# Altium footprint library Diodes.PcbLib: 7 footprints
Each footprint in its own frame and in the unit in brackets; x right, y up, seen from the top. Pads: shape width x height; smd on the part's side, far side on the other; paste and mask are expansions set on the pad; w line width, h text height; cw(c..) or ccw(c..) is an arc to the next point about the centre after c.
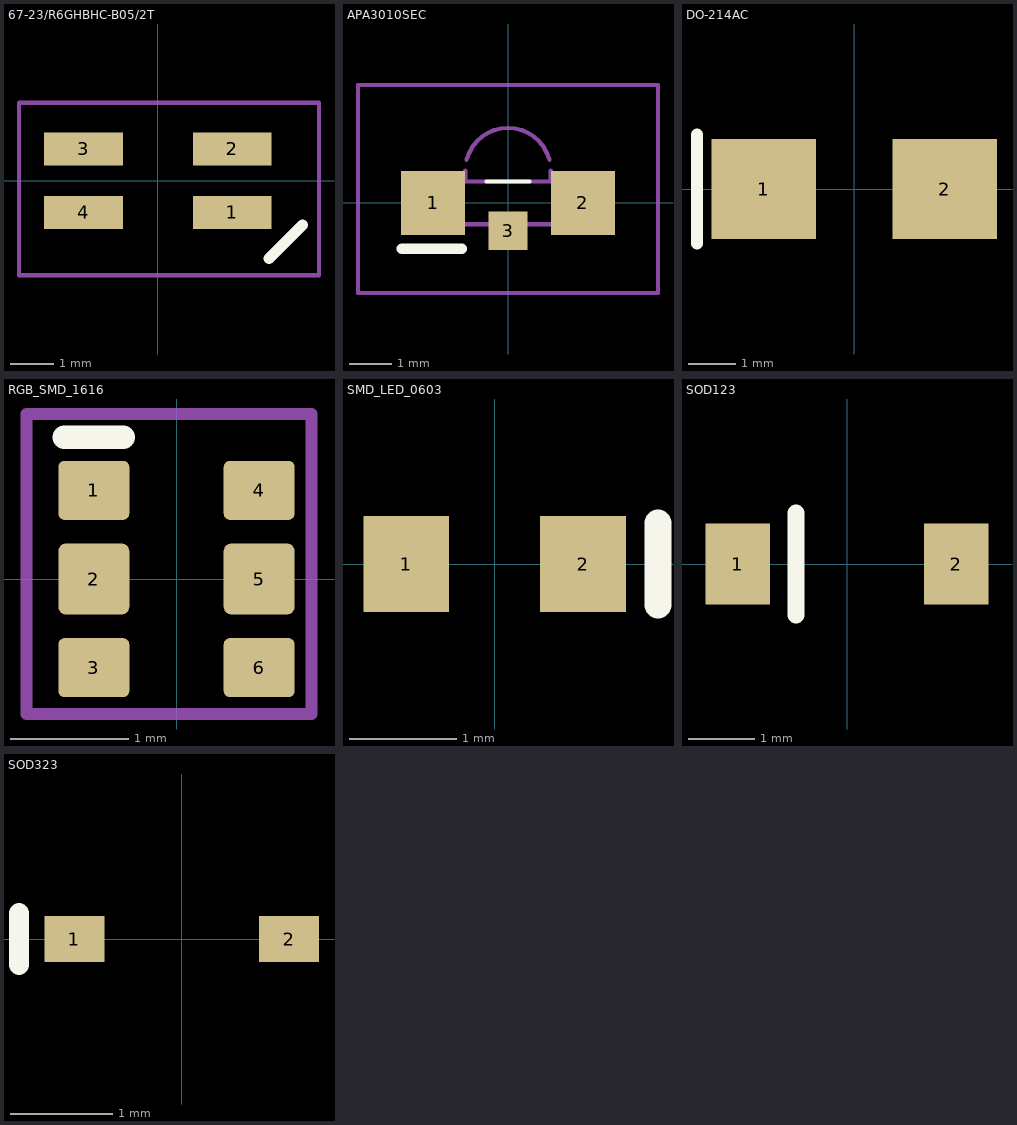
[diagram p0: the footprints below, top view; thin cyan lines are the x and y axes]

## 67-23/R6GHBHC-B05/2T [mm]
pads (4):
  rect 1.8x0.75 smd: 1(1.7,-0.725) 2(1.7,0.725) 3(-1.7,0.725) 4(-1.7,-0.725)
Top Overlay:
  lines w0.254: 2.54,-1.778 3.302,-1.016
Mechanical 15:
  lines w0.1: -3.175,-2.159 3.683,-2.159 3.683,1.778 -3.175,1.778 -3.175,-2.159
3D body "LED_SMD_3528 v4.step": height 1.9, standoff 0, extent -1.75,-1.35 1.75,1.35

## APA3010SEC [mm]
pads (3):
  rect 1.5x1.5 smd: 1(-1.75,0) 2(1.75,0)
  rect 0.9x0.9 smd: 3(0,-0.65)
Top Overlay:
  lines w0.1: -0.5,0.5 0.5,0.5
  lines w0.254: -2.476,-1.07 -2.127,-1.07 -1.429,-1.07 -1.079,-1.07
Mechanical 13:
  lines w0.1: -1,0.5 -1,0.75 ; -0.966,1.009 cw(c0,0.75) 0.966,1.009 ; 1,0.5 1,0.75 ; -1.5,-0.5 -1.5,0.5 1.5,0.5 1.5,-0.5 -1.5,-0.5
Mechanical 15:
  lines w0.1: -3.5,-2.1 -3.5,2.75 3.5,2.75 3.5,-2.1 -3.5,-2.1
3D body "APA3010SEC v2.step": height 1, standoff 0, extent -1.525,-0.374 1.525,1.651

## DO-214AC [mm]
pads (2):
  rect 2.2x2.1 smd: 1(-1.9,0) 2(1.9,0)
Top Overlay:
  lines w0.254: -3.302,-1.143 -3.302,1.143
3D body "DO-214AC v4.step": height 2.15, standoff 0, extent -2.45,-1.348 2.45,1.348

## RGB_SMD_1616 [mm] "3.5mm height, 1.6mm x 1.6mm, 6-pad, RGB"
pads (6):
  rrect20% 0.6x0.5 smd mask+0.03: 1(-0.7,0.75) 3(-0.7,-0.75) 4(0.7,0.75) 6(0.7,-0.75)
  rrect20% 0.6x0.6 smd mask+0.03: 2(-0.7,0) 5(0.7,0)
Top Overlay:
  lines w0.2: -0.95,1.2 -0.45,1.2
Mechanical 15:
  lines w0.1: -1.27,-1.143 -1.27,1.397 1.143,1.397 1.143,-1.143 -1.27,-1.143
3D body "1616v2.step": height 0.37, standoff 0, extent -0.8,-0.8 0.8,0.8

## SMD_LED_0603 [mm] "Generic 0603 SMD LED. Based on \"KP-1608SGD SUPER BRIGHT GREEN\""
pads (2):
  rect 0.8x0.9 smd: 1(-0.825,0) 2(0.825,0)
Top Overlay:
  lines w0.254: 1.524,-0.381 1.524,0.381
3D body "SMD_LED_0603 v3.step": height 1.1, standoff -0.01, extent -0.81,-0.4 0.81,0.4

## SOD123 [mm] "ref. to BAT43W_R1_00001 specs"
pads (2):
  rect 0.97x1.22 smd: 1(-1.64,0) 2(1.64,0)
Top Overlay:
  lines w0.254: -0.762,-0.762 -0.762,0.762
3D body "SOD-123 v7.step": height 1.29, standoff 0, extent -1.771,-0.899 1.77,0.899

## SOD323 [mm] "Diode directional 1.7mm x 1.3mm"
pads (2):
  rect 0.59x0.45 smd mask+0.045: 1(-1.055,0) 2(1.055,0)
Top Overlay:
  lines w0.2: -1.6,-0.254 -1.6,0.254
3D body "SOD323.step": height 1.05, standoff -0.05, extent -1.248,-0.649 1.248,0.649